# Altium footprint library Inductance.PcbLib: 64 footprints (part 1 of 4)
Each footprint in its own frame and in the unit in brackets; x right, y up, seen from the top. Pads: shape width x height; smd on the part's side, far side on the other; paste and mask are expansions set on the pad; w line width, h text height; cw(c..) or ccw(c..) is an arc to the next point about the centre after c.
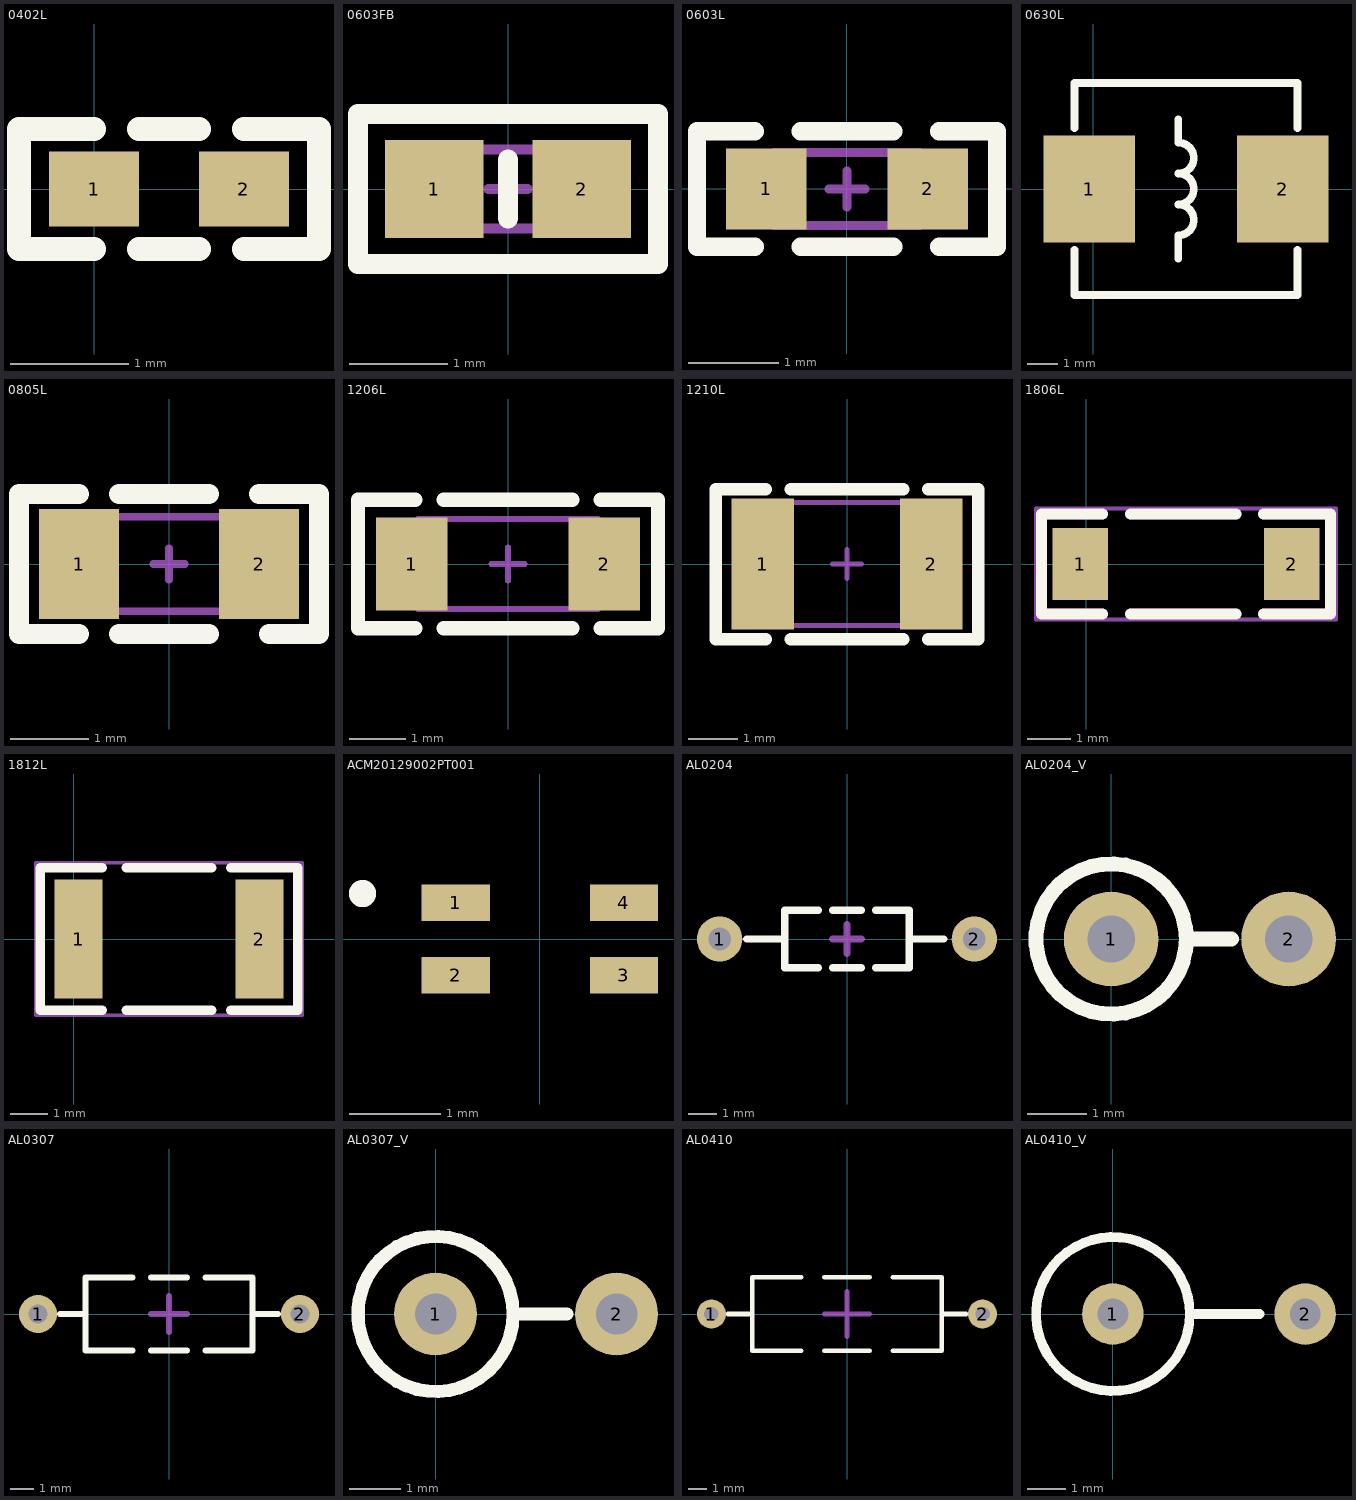
[diagram p0: the footprints below, top view; thin cyan lines are the x and y axes]

## 0402L [mil]
pads (2):
  rect 30x25 smd: 1(0,0) 2(50,0)
Top Overlay:
  lines w8: 0,-20 -25,-20 -25,20 -15,20 0,20 ; 15,-20 35,-20 ; 15,20 35,20 ; 50,-20 75,-20 75,20 50,20
Top Designator:
  text ".Designator" at 324.9,-19.99 h60
3D body "0402L.STEP": height 19.68, standoff 0, extent 5.31,-9.68 44.69,10

## 0603FB [mm] "0603磁珠"
pads (2):
  rect 1x1 smd: 1(-0.75,0) 2(0.75,0)
Top Overlay:
  lines w0.2: 0,-0.3 0,0.3
  lines w0.203: -1.524,-0.762 1.524,-0.762 1.524,0.762 -1.524,0.762 -1.524,-0.762
Top Component Outline:
  lines w0.1: -0.8,-0.4 0.8,-0.4 0.8,0.4 -0.8,0.4 -0.8,-0.4
Top Component Center:
  lines w0.1: -0.2,0 0.2,0 ; 0,-0.2 0,0.2
Bottom Component Center:
  lines w0.203: -1.524,-0.762 -1.524,0.762 1.524,0.762 1.524,-0.762 -1.524,-0.762
Top Value:
  text "'.Comment'" at -2.75,-0.38 h0.76
Top Designator:
  text ".Designator" at 2.205,-0.186 h0.89
3D body "BLM18PG121SZ1D.stp": height 0.95, standoff 0, extent -0.8,-0.4 0.8,0.4

## 0603L [mil] "小功率贴片电感"
pads (2):
  rect 35x35 smd: 1(-35,0) 2(35,0)
Top Overlay:
  lines w8: -40,-25 -65,-25 -65,25 -40,25 ; -20,-25 20,-25 ; -20,25 20,25 ; 40,-25 65,-25 65,25 40,25
Top Component Outline:
  lines w3.94: -31.5,-15.75 -31.5,15.75 31.5,15.75 31.5,-15.75 -31.5,-15.75
Top Component Center:
  lines w3.94: -7.87,0 7.87,0 ; 0,-7.87 0,7.87
Top Value:
  text "'.Comment'" at -64.67,-8.93 h30
Top Designator:
  text ".Designator" at -86.79,-7.33 h35
3D body "0603L.STEP": height 31.5, standoff 0, extent -31.5,-16.5 31.5,15

## 0630L [mm]
pads (2):
  rect 3x3.5 smd: 1(-0.127,0) 2(6.223,0)
Top Overlay:
  lines w0.254: -0.61,-2.007 -0.61,-3.48 6.706,-3.48 6.706,-2.007 ; -0.61,2.007 -0.61,3.48 6.706,3.48 6.706,2.007 ; 2.794,-2.286 2.794,-1.524 ccw(c2.794,-1.016) 2.794,-0.508 ccw(c2.794,0) 2.794,0.508 ccw(c2.794,1.016) 2.794,1.524 2.794,2.286
Top Designator:
  text ".Designator" at 10.666,-0.508 h1.52
3D body "SMD0630L.STEP": height 3.05, standoff 0.02, extent -0.554,-3.046 6.396,3.554

## 0805L [mil] "小功率贴片电感"
pads (2):
  rect 40x55 smd: 1(-45,0) 2(45,0)
Top Overlay:
  lines w10: -45,-35 -75,-35 -75,35 -45,35 ; -25,-35 20,-35 ; -25,35 20,35 ; 45,35 75,35 75,-35 50,-35
Top Component Outline:
  lines w3.94: -39.37,-23.62 39.37,-23.62 39.37,23.62 -39.37,23.62 -39.37,-23.62
Top Component Center:
  lines w3.94: -7.87,0 7.87,0 ; 0,-7.87 0,7.87
Top Value:
  text "'.Comment'" at -75.92,-10.48 h35
Top Designator:
  text ".Designator" at -99.11,-8.37 h40
3D body "0805L.STEP": height 35.43, standoff 0, extent -39.37,-23.62 39.37,23.62

## 1206L [mil] "小功率贴片电感"
pads (2):
  rect 50x65 smd: 1(-67.5,0) 2(67.5,0)
Top Overlay:
  lines w10: -65,-45 -105,-45 -105,45 -65,45 ; -45,-45 45,-45 ; -45,45 45,45 ; 65,-45 105,-45 105,45 65,45
Top Component Outline:
  lines w3.94: -62.99,-31.5 62.99,-31.5 62.99,31.5 -62.99,31.5 -62.99,-31.5
Top Component Center:
  lines w3.94: -11.81,0 11.81,0 ; 0,-11.81 0,11.81
Top Value:
  text "'.Comment'" at -75.92,-10.48 h35
Top Designator:
  text ".Designator" at -99.11,-8.37 h40
3D body "1206L.STEP": height 35.43, standoff 0, extent -62.99,-31.5 62.99,31.5

## 1210L [mil] "小功率贴片电感"
pads (2):
  rect 50x105 smd: 1(-67.5,0) 2(67.5,0)
Top Overlay:
  lines w10: -65,-60 -105,-60 -105,60 -65,60 ; -45,-60 45,-60 ; -45,60 45,60 ; 65,-60 105,-60 105,60 65,60
Top Component Outline:
  lines w3.94: -63.98,-49.21 63.98,-49.21 63.98,49.21 -63.98,49.21 -63.98,-49.21
Top Component Center:
  lines w3.94: -11.81,0 11.81,0 ; 0,-11.81 0,11.81
Top Value:
  text "'.Comment'" at -86.7,-11.97 h40
Top Designator:
  text ".Designator" at -111.44,-9.41 h45
3D body "1210L.STEP": height 51.18, standoff 0, extent -62.99,-49.21 62.99,49.21

## 1806L [mil] "小功率贴片电感"
pads (2):
  rect 50x65 smd: 1(-5,0) 2(185,0)
Top Overlay:
  lines w10: 15,-45 -40,-45 -40,45 15,45 ; 40,-45 135,-45 ; 40,45 135,45 ; 160,-45 220,-45 220,-40 220,-15 220,45 160,45
Bottom Component Center:
  lines w10: 15,-45 -40,-45 -40,45 15,45 ; 40,-45 135,-45 ; 40,45 135,45 ; 160,-45 220,-45 220,-40 220,-15 220,45 160,45
Top Designator:
  text ".Designator" at 391.85,-19.99 h60
Bottom Courtyard:
  lines w3.94: -45,-50 225,-50 225,50 -45,50 -45,-50
  text "'.Designator'" at -80,-15 h60
3D body "1806.STEP": height 62.99, standoff -0.19, extent 1.42,-31.5 178.58,31.5

## 1812L [mil] "小功率贴片电感"
pads (2):
  rect 50x125 smd: 1(5,0) 2(195,0)
Top Overlay:
  lines w10: 30,-75 -35,-75 -35,75 30,75 ; 55,-75 145,-75 ; 55,75 145,75 ; 165,-75 235,-75 235,75 165,75
Top Designator:
  text ".Designator" at 411.85,-19.99 h60
Bottom Courtyard:
  lines w3.94: -40,-80 240,-80 240,80 -40,80 -40,-80
  text "'.Designator'" at -60,-20 h60
3D body "1812L.STEP": height 59.06, standoff 0, extent 15,-62.99 192.16,62.99

## ACM20129002PT001 [mm]
pads (4):
  rect 0.75x0.4 smd: 1(-0.925,0.4) 2(-0.925,-0.4) 3(0.925,-0.4) 4(0.925,0.4)
Top Overlay:
  lines w0.2: -2,0.5 ccw(c-1.95,0.5) -1.9,0.5 ; -2,0.5 cw(c-1.95,0.5) -1.9,0.5 ; -2,0.5 ccw(c-1.95,0.5) -1.9,0.5
Top Designator:
  text ".Designator" at 7.268,-0.508 h1.52
3D body "ACM2012-900-2P-T001.stp": height 1.4, standoff 0, extent -1.26,-0.6 1.26,0.6

## AL0204 [mm] "9*2*4mm（脚距，直径，长度）"
pads (2):
  round 1.6 hole 0.8: 1(-4.5,0) 2(4.5,0)
Top Overlay:
  lines w0.254: -3.556,0 -2.2,0 ; -1.016,-1.016 -2.2,-1.016 -2.2,1.016 -1.016,1.016 ; -0.508,-1.016 0.508,-1.016 ; -0.508,1.016 0.508,1.016 ; 1.016,-1.016 2.2,-1.016 2.2,1.016 1.016,1.016 ; 2.2,0 3.429,0
Top Designator:
  text ".Designator" at 7.618,-0.508 h1.52
Bottom Courtyard:
  lines w0.254: -0.508,0 0.508,0 ; 0,-0.508 0,0.508
3D body "AL0204.STEP": height 2.07, standoff -3.5, extent -4.75,-1.016 4.75,1.017

## AL0204_V [mm] "3*2*4mm（脚距，直径，长度）"
pads (2):
  round 1.6 hole 0.8: 1(0,0) 2(3,0)
Top Overlay:
  circle w0.254: c0,0 r1.27
  lines w0.254: 1.27,0 2.032,0
Top Designator:
  text ".Designator" at 8.87,-0.508 h1.52
3D body "AL0204_V.STEP": height 5.48, standoff -3.5, extent -1.084,-1.009 3.175,1.009

## AL0307 [mm] "11*3*7mm（脚距，直径，长度）"
pads (2):
  round 1.6 hole 0.8: 1(-5.5,0) 2(5.5,0)
Top Overlay:
  lines w0.254: -4.572,0 -3.5,0 ; -1.524,-1.524 -3.5,-1.524 -3.5,1.524 -1.524,1.524 ; -0.762,-1.524 0.762,-1.524 ; -0.762,1.524 0.762,1.524 ; 1.524,-1.524 3.5,-1.524 3.5,1.524 1.524,1.524 ; 3.5,0 4.572,0
Top Designator:
  text ".Designator" at 7.618,-0.508 h1.52
Bottom Courtyard:
  lines w0.254: -0.762,0 0.762,0 ; 0,-0.762 0,0.762
3D body "AL0307.STEP": height 3.06, standoff -3.5, extent -5.715,-1.508 5.835,1.508

## AL0307_V [mm] "3.5*3*7mm（脚距，直径，长度）"
pads (2):
  round 1.6 hole 0.8: 1(0,0) 2(3.5,0)
Top Overlay:
  circle w0.254: c0,0 r1.5
  lines w0.254: 1.5,0 2.54,0
Top Designator:
  text ".Designator" at 9.005,-0.508 h1.52
3D body "AL0307_V.STEP": height 8.81, standoff -3.5, extent -1.487,-1.524 3.81,1.514

## AL0410 [mm] "15*4*10.5mm（脚距，直径，长度）"
pads (2):
  round 1.6 hole 0.8: 1(-7.5,0) 2(7.5,0)
Top Overlay:
  lines w0.254: -6.604,0 -5.25,0 ; -2.54,-2.032 -5.25,-2.032 -5.25,2.032 -2.54,2.032 ; -1.27,-2.032 1.27,-2.032 ; -1.27,2.032 1.27,2.032 ; 2.54,-2.032 5.25,-2.032 5.25,2.032 2.54,2.032 ; 5.25,0 6.604,0
Top Designator:
  text ".Designator" at 7.618,-0.508 h1.52
Bottom Courtyard:
  lines w0.254: -1.27,0 1.27,0 ; 0,-1.27 0,1.27
3D body "AL0410.STEP": height 4.06, standoff -3.5, extent -7.747,-2.005 7.803,2.005

## AL0410_V [mm] "5*4*10.5mm（脚距，直径，长度）"
pads (2):
  round 1.6 hole 0.8: 1(0,0) 2(5,0)
Top Overlay:
  circle w0.254: c0,0 r2
  lines w0.254: 2,0 3.81,0
Top Designator:
  text ".Designator" at 9.505,-0.508 h1.52
3D body "AL0410_V.STEP": height 12.39, standoff -3.5, extent -2.001,-2.004 5.334,2.004